# Altium schematic symbol library RB521S30.SchLib: 1 symbol
Pins are listed as number, name and electrical type; pins without a type are passive.

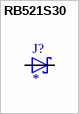
[diagram p0: symbol RB521S30]

## RB521S30
designator J?
Diode 30 V 200mA Surface Mount SOD-523F; MF: Taiwan Semiconductor; MP: RB521S-30; SnapEDA_Link: https://www.snapeda.com/parts/RB521S-30/taiwan/view-part/?ref=snap; Package: SOD-523F-2 Taiwan Semiconductor; Value: *; Check_prices: https://www.snapeda.com/parts/RB521S-30/taiwan/view-part/?ref=eda
footprint SOD523
pins: 1 K, 2 A